# Altium footprint library PcbLib1.PcbLib: 1 footprints
Each footprint in its own frame and in the unit in brackets; x right, y up, seen from the top. Pads: shape width x height; smd on the part's side, far side on the other; paste and mask are expansions set on the pad; w line width, h text height; cw(c..) or ccw(c..) is an arc to the next point about the centre after c.
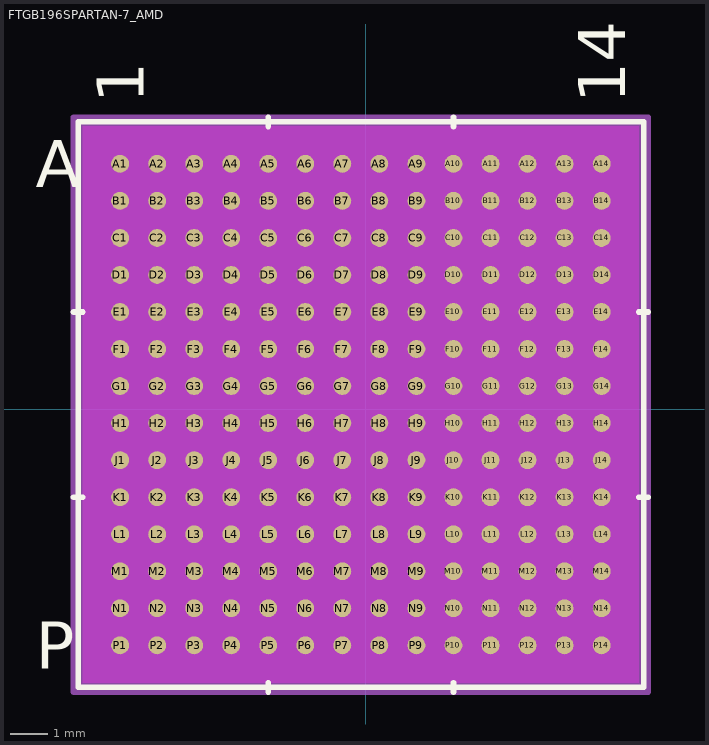
[diagram p0: the footprint, top view; thin cyan lines are the x and y axes]

## FTGB196SPARTAN-7_AMD [mil]
pads (196):
  round 19 smd paste+0 mask+0: A1(-260.91,260.91) A2(-221.54,260.91) A3(-182.17,260.91) A4(-142.8,260.91) A5(-103.43,260.91) A6(-64.06,260.91) A7(-24.69,260.91) A8(14.69,260.91) A9(54.06,260.91) A10(93.43,260.91) A11(132.8,260.91) A12(172.17,260.91) A13(211.54,260.91) A14(250.91,260.91) B1(-260.91,221.54) B2(-221.54,221.54) B3(-182.17,221.54) B4(-142.8,221.54) B5(-103.43,221.54) B6(-64.06,221.54) B7(-24.69,221.54) B8(14.69,221.54) B9(54.06,221.54) B10(93.43,221.54) B11(132.8,221.54) B12(172.17,221.54) B13(211.54,221.54) B14(250.91,221.54) C1(-260.91,182.17) C2(-221.54,182.17) C3(-182.17,182.17) C4(-142.8,182.17) C5(-103.43,182.17) C6(-64.06,182.17) C7(-24.69,182.17) C8(14.69,182.17) C9(54.06,182.17) C10(93.43,182.17) C11(132.8,182.17) C12(172.17,182.17) C13(211.54,182.17) C14(250.91,182.17) D1(-260.91,142.8) D2(-221.54,142.8) D3(-182.17,142.8) D4(-142.8,142.8) D5(-103.43,142.8) D6(-64.06,142.8) D7(-24.69,142.8) D8(14.69,142.8) D9(54.06,142.8) D10(93.43,142.8) D11(132.8,142.8) D12(172.17,142.8) D13(211.54,142.8) D14(250.91,142.8) E1(-260.91,103.43) E2(-221.54,103.43) E3(-182.17,103.43) E4(-142.8,103.43) E5(-103.43,103.43) E6(-64.06,103.43) E7(-24.69,103.43) E8(14.69,103.43) E9(54.06,103.43) E10(93.43,103.43) E11(132.8,103.43) E12(172.17,103.43) E13(211.54,103.43) E14(250.91,103.43) F1(-260.91,64.06) F2(-221.54,64.06) F3(-182.17,64.06) F4(-142.8,64.06) F5(-103.43,64.06) F6(-64.06,64.06) F7(-24.69,64.06) F8(14.69,64.06) F9(54.06,64.06) F10(93.43,64.06) F11(132.8,64.06) F12(172.17,64.06) F13(211.54,64.06) F14(250.91,64.06) G1(-260.91,24.69) G2(-221.54,24.69) G3(-182.17,24.69) G4(-142.8,24.69) G5(-103.43,24.69) G6(-64.06,24.69) G7(-24.69,24.69) G8(14.69,24.69) G9(54.06,24.69) G10(93.43,24.69) G11(132.8,24.69) G12(172.17,24.69) G13(211.54,24.69) G14(250.91,24.69) H1(-260.91,-14.69) H2(-221.54,-14.69) H3(-182.17,-14.69) H4(-142.8,-14.69) H5(-103.43,-14.69) H6(-64.06,-14.69) H7(-24.69,-14.69) H8(14.69,-14.69) H9(54.06,-14.69) H10(93.43,-14.69) H11(132.8,-14.69) H12(172.17,-14.69) H13(211.54,-14.69) H14(250.91,-14.69) J1(-260.91,-54.06) J2(-221.54,-54.06) J3(-182.17,-54.06) J4(-142.8,-54.06) J5(-103.43,-54.06) J6(-64.06,-54.06) J7(-24.69,-54.06) J8(14.69,-54.06) J9(54.06,-54.06) J10(93.43,-54.06) J11(132.8,-54.06) J12(172.17,-54.06) J13(211.54,-54.06) J14(250.91,-54.06) K1(-260.91,-93.43) K2(-221.54,-93.43) K3(-182.17,-93.43) K4(-142.8,-93.43) K5(-103.43,-93.43) K6(-64.06,-93.43) K7(-24.69,-93.43) K8(14.69,-93.43) K9(54.06,-93.43) K10(93.43,-93.43) K11(132.8,-93.43) K12(172.17,-93.43) K13(211.54,-93.43) K14(250.91,-93.43) L1(-260.91,-132.8) L2(-221.54,-132.8) L3(-182.17,-132.8) L4(-142.8,-132.8) L5(-103.43,-132.8) L6(-64.06,-132.8) L7(-24.69,-132.8) L8(14.69,-132.8) L9(54.06,-132.8) L10(93.43,-132.8) L11(132.8,-132.8) L12(172.17,-132.8) L13(211.54,-132.8) L14(250.91,-132.8) M1(-260.91,-172.17) M2(-221.54,-172.17) M3(-182.17,-172.17) M4(-142.8,-172.17) M5(-103.43,-172.17) M6(-64.06,-172.17) M7(-24.69,-172.17) M8(14.69,-172.17) M9(54.06,-172.17) M10(93.43,-172.17) M11(132.8,-172.17) M12(172.17,-172.17) M13(211.54,-172.17) M14(250.91,-172.17) N1(-260.91,-211.54) N2(-221.54,-211.54) N3(-182.17,-211.54) N4(-142.8,-211.54) N5(-103.43,-211.54) N6(-64.06,-211.54) N7(-24.69,-211.54) N8(14.69,-211.54) N9(54.06,-211.54) N10(93.43,-211.54) N11(132.8,-211.54) N12(172.17,-211.54) N13(211.54,-211.54) N14(250.91,-211.54) P1(-260.91,-250.91) P2(-221.54,-250.91) P3(-182.17,-250.91) P4(-142.8,-250.91) P5(-103.43,-250.91) P6(-64.06,-250.91) P7(-24.69,-250.91) P8(14.69,-250.91) P9(54.06,-250.91) P10(93.43,-250.91) P11(132.8,-250.91) P12(172.17,-250.91) P13(211.54,-250.91) P14(250.91,-250.91)
Top Overlay:
  lines w6: -310.5,-93.43 -300.5,-93.43 ; -310.5,103.43 -300.5,103.43 ; -103.43,-300.5 -103.43,-290.5 ; -103.43,300.5 -103.43,310.5 ; 93.43,-300.5 93.43,-290.5 ; 93.43,300.5 93.43,310.5 ; 290.5,-93.43 300.5,-93.43 ; 290.5,103.43 300.5,103.43 ; -305.5,-295.5 295.5,-295.5 295.5,305.5 -305.5,305.5 -305.5,-295.5
  text "A" at -350.5,235.91 h50
  text "P" at -350.5,-275.91 h50
  text "1" at -235.91,325.5 h50
  text "14" at 275.91,325.5 h50
  text ".Designator" at -142.5,-20 h50
Bottom Overlay:
  text "A" at -325.5,235.91 h50
  text "P" at -325.5,-275.91 h50
  text "1" at -285.91,325.5 h50
  text "14" at 225.91,325.5 h50
Keep-Out Layer:
  region: -300.59,-290.59 -300.59,300.59 290.59,300.59 290.59,-290.59
Mechanical 13:
  lines w1: -300.5,280.81 -280.81,300.5 ; -300.5,-290.5 290.5,-290.5 290.5,300.5 -300.5,300.5 -300.5,-290.5
  text ".Designator" at -142.5,-20 h50
  text "A" at -350.5,235.91 h50
  text "P" at -350.5,-275.91 h50
  text "1" at -235.91,325.5 h50
  text "14" at 275.91,325.5 h50
Mechanical 15:
  region: 300.5,-300.5 -310.5,-300.5 -310.5,310.5 300.5,310.5
  lines w6: -310.5,-300.5 -310.5,310.5 300.5,310.5 300.5,-300.5 -310.5,-300.5
3D body "FTGB196SPARTAN-7_AMD.step": height 61.1, standoff 0.01, extent -300.51,-290.51 290.51,300.51